# Altium schematic symbol library CS12ANW03.SchLib: 1 symbol
Pins are listed as number, name and electrical type; pins without a type are passive.

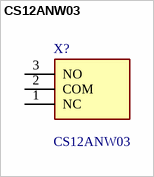
[diagram p0: symbol CS12ANW03]

## CS12ANW03
designator X?
NKK SWITCHES - CS12ANW03 - SWITCH, SLIDE, SPDT, 3A, 250V, TH; Geometry.Height: 13.6mm; Mouser Part Number: 633-CS12ANW03; Mouser Price/Stock: https://www.mouser.co.uk/ProductDetail/NKK-Switches/CS12ANW03?qs=4P1McwaGddbVHu%252BBZT0egw%3D%3D; Manufacturer_Name: NKK Switches; Manufacturer_Part_Number: CS12ANW03; Datasheet Link: https://www.nkkswitches.com.hk/products/Slides/Slides%20CS/CS12ANW03/
footprint CS12ANW03
pins: 1 NC, 2 COM, 3 NO